# Altium footprint library FPC.PcbLib: 104 footprints (part 6 of 7)
Each footprint in its own frame and in the unit in brackets; x right, y up, seen from the top. Pads: shape width x height; smd on the part's side, far side on the other; paste and mask are expansions set on the pad; w line width, h text height; cw(c..) or ccw(c..) is an arc to the next point about the centre after c.
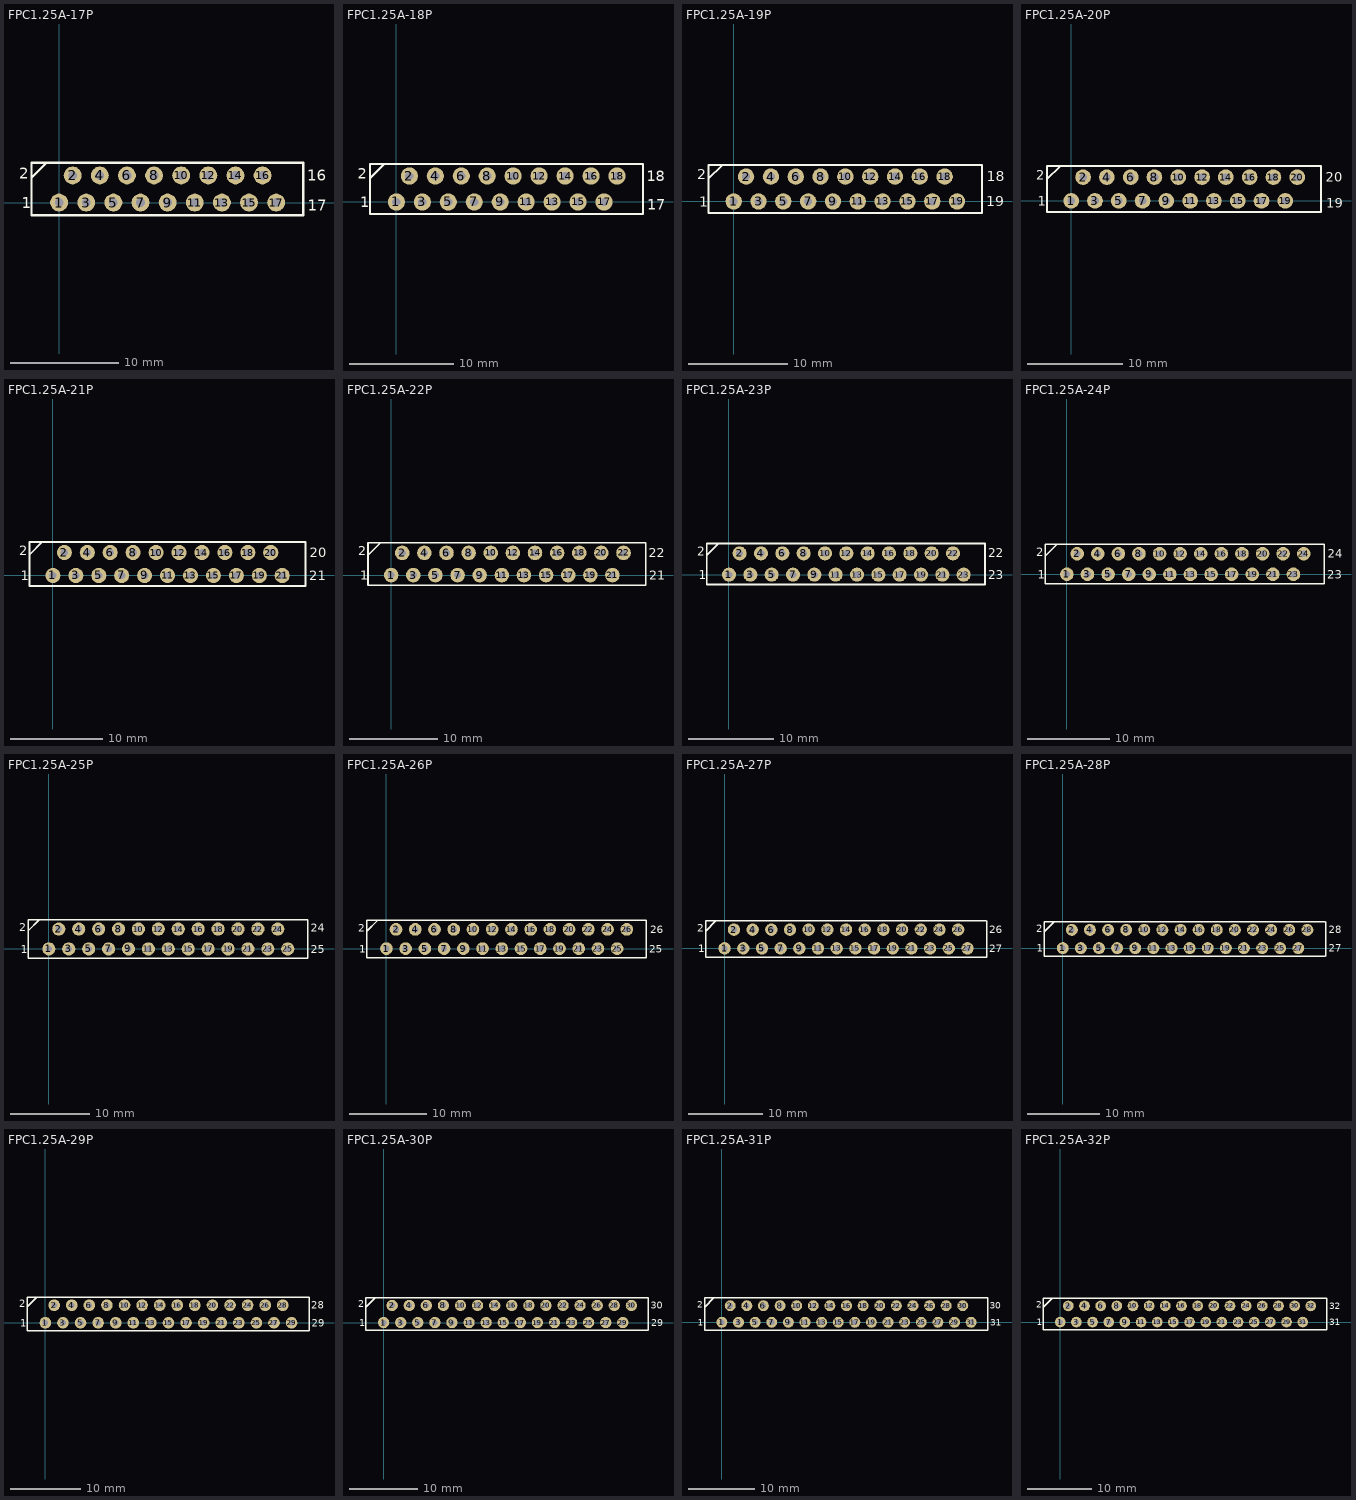
[diagram p5: the footprints below, top view; thin cyan lines are the x and y axes]

## FPC1.25A-17P [mm]
pads (17):
  round 1.65 hole 0.8: 1(0,0) 2(1.25,2.5) 3(2.5,0) 4(3.75,2.5) 5(5,0) 6(6.25,2.5) 7(7.5,0) 8(8.75,2.5) 9(10,0) 10(11.25,2.5) 11(12.5,0) 12(13.75,2.5) 13(15,0) 14(16.25,2.5) 15(17.5,0) 16(18.75,2.5) 17(20,0)
Top Overlay:
  lines w0.2: -2.553,2.266 -1.156,3.663 ; -2.553,-1.163 -2.553,3.663 22.5,3.663 22.5,-1.163 -2.553,-1.163
  text "17" at 22.932,-0.731 h1.02
  text "16" at 22.881,2.012 h1.02
  text "2" at -3.696,2.215 h1.02
  text "1" at -3.462,-0.528 h1.02
3D body "FPC1.25-17P.STEP": height 7.3, standoff -2.55, extent -2.371,-0.98 22.479,3.52

## FPC1.25A-18P [mm]
pads (18):
  round 1.65 hole 0.8: 1(0,0) 2(1.25,2.5) 3(2.5,0) 4(3.75,2.5) 5(5,0) 6(6.25,2.5) 7(7.5,0) 8(8.75,2.5) 9(10,0) 10(11.25,2.5) 11(12.5,0) 12(13.75,2.5) 13(15,0) 14(16.25,2.5) 15(17.5,0) 16(18.75,2.5) 17(20,0) 18(21.25,2.5)
Top Overlay:
  lines w0.2: -2.553,2.266 -1.156,3.663 ; -2.553,-1.163 -2.553,3.663 23.75,3.663 23.75,-1.163 -2.553,-1.163
  text "17" at 24.182,-0.731 h1.02
  text "18" at 24.131,2.012 h1.02
  text "2" at -3.696,2.215 h1.02
  text "1" at -3.472,-0.528 h1.02
3D body "FPC1.25-18P.STEP": height 7.3, standoff -2.55, extent -2.478,-0.98 23.622,3.52

## FPC1.25A-19P [mm]
pads (19):
  round 1.65 hole 0.8: 1(0,0) 2(1.25,2.5) 3(2.5,0) 4(3.75,2.5) 5(5,0) 6(6.25,2.5) 7(7.5,0) 8(8.75,2.5) 9(10,0) 10(11.25,2.5) 11(12.5,0) 12(13.75,2.5) 13(15,0) 14(16.25,2.5) 15(17.5,0) 16(18.75,2.5) 17(20,0) 18(21.25,2.5) 19(22.5,0)
Top Overlay:
  lines w0.2: -2.553,2.266 -1.156,3.663 ; -2.553,-1.163 -2.553,3.663 25,3.663 25,-1.163 -2.553,-1.163
  text "19" at 25.455,-0.508 h1.02
  text "18" at 25.508,2.012 h1.02
  text "2" at -3.696,2.215 h1.02
  text "1" at -3.482,-0.528 h1.02
3D body "FPC1.25-19P.STEP": height 7.3, standoff -2.55, extent -2.458,-0.98 24.892,3.52

## FPC1.25A-20P [mm]
pads (20):
  round 1.65 hole 0.8: 1(0,0) 2(1.25,2.5) 3(2.5,0) 4(3.75,2.5) 5(5,0) 6(6.25,2.5) 7(7.5,0) 8(8.75,2.5) 9(10,0) 10(11.25,2.5) 11(12.5,0) 12(13.75,2.5) 13(15,0) 14(16.25,2.5) 15(17.5,0) 16(18.75,2.5) 17(20,0) 18(21.25,2.5) 19(22.5,0) 20(23.75,2.5)
Top Overlay:
  lines w0.2: -2.553,2.266 -1.156,3.663 ; -2.553,-1.163 26.25,-1.163 26.25,3.663 -2.553,3.663 -2.553,-1.163
  text "1" at -3.492,-0.528 h1.02
  text "2" at -3.696,2.215 h1.02
  text "20" at 26.758,2.012 h1.02
  text "19" at 26.809,-0.731 h1.02
3D body "FPC1.25-20P.STEP": height 7.3, standoff -2.55, extent -2.438,-0.98 26.162,3.52

## FPC1.25A-21P [mm]
pads (21):
  round 1.65 hole 0.8: 1(0,0) 2(1.25,2.5) 3(2.5,0) 4(3.75,2.5) 5(5,0) 6(6.25,2.5) 7(7.5,0) 8(8.75,2.5) 9(10,0) 10(11.25,2.5) 11(12.5,0) 12(13.75,2.5) 13(15,0) 14(16.25,2.5) 15(17.5,0) 16(18.75,2.5) 17(20,0) 18(21.25,2.5) 19(22.5,0) 20(23.75,2.5) 21(25,0)
Top Overlay:
  lines w0.2: -2.553,2.266 -1.156,3.663 ; -2.553,-1.163 27.553,-1.163 27.553,3.663 -2.553,3.663 -2.553,-1.163
  text "1" at -3.502,-0.528 h1.02
  text "2" at -3.696,2.215 h1.02
  text "20" at 27.994,2.012 h1.02
  text "21" at 27.934,-0.528 h1.02
3D body "FPC1.25-21P.STEP": height 7.3, standoff -2.55, extent -2.468,-0.98 27.432,3.52

## FPC1.25A-22P [mm]
pads (22):
  round 1.65 hole 0.8: 1(0,0) 2(1.25,2.5) 3(2.5,0) 4(3.75,2.5) 5(5,0) 6(6.25,2.5) 7(7.5,0) 8(8.75,2.5) 9(10,0) 10(11.25,2.5) 11(12.5,0) 12(13.75,2.5) 13(15,0) 14(16.25,2.5) 15(17.5,0) 16(18.75,2.5) 17(20,0) 18(21.25,2.5) 19(22.5,0) 20(23.75,2.5) 21(25,0) 22(26.25,2.5)
Top Overlay:
  lines w0.2: -2.606,2.266 -1.209,3.663 ; -2.606,-1.163 28.75,-1.163 28.75,3.663 -2.606,3.663 -2.606,-1.163
  text "1" at -3.512,-0.528 h1.02
  text "2" at -3.749,2.215 h1.02
  text "22" at 29.127,2.012 h1.02
  text "21" at 29.131,-0.528 h1.02
3D body "FPC1.25-22P.STEP": height 7.3, standoff -2.55, extent -2.413,-0.98 28.687,3.52

## FPC1.25A-23P [mm]
pads (23):
  round 1.65 hole 0.8: 1(0,0) 2(1.25,2.5) 3(2.5,0) 4(3.75,2.5) 5(5,0) 6(6.25,2.5) 7(7.5,0) 8(8.75,2.5) 9(10,0) 10(11.25,2.5) 11(12.5,0) 12(13.75,2.5) 13(15,0) 14(16.25,2.5) 15(17.5,0) 16(18.75,2.5) 17(20,0) 18(21.25,2.5) 19(22.5,0) 20(23.75,2.5) 21(25,0) 22(26.25,2.5) 23(27.5,0)
Top Overlay:
  lines w0.2: -2.606,2.266 -1.209,3.663 ; -2.606,-1.163 -2.606,3.663 30,3.663 30,-1.163 -2.606,-1.163
  text "23" at 30.381,-0.528 h1.02
  text "22" at 30.387,2.012 h1.02
  text "2" at -3.749,2.215 h1.02
  text "1" at -3.522,-0.528 h1.02
3D body "FPC1.25-23P.STEP": height 7.3, standoff -2.55, extent -2.505,-0.98 29.845,3.52

## FPC1.25A-24P [mm]
pads (24):
  round 1.65 hole 0.8: 1(0,0) 2(1.25,2.5) 3(2.5,0) 4(3.75,2.5) 5(5,0) 6(6.25,2.5) 7(7.5,0) 8(8.75,2.5) 9(10,0) 10(11.25,2.5) 11(12.5,0) 12(13.75,2.5) 13(15,0) 14(16.25,2.5) 15(17.5,0) 16(18.75,2.5) 17(20,0) 18(21.25,2.5) 19(22.5,0) 20(23.75,2.5) 21(25,0) 22(26.25,2.5) 23(27.5,0) 24(28.75,2.5)
Top Overlay:
  lines w0.2: -2.606,2.266 -1.209,3.663 ; -2.606,-1.163 31.25,-1.163 31.25,3.663 -2.606,3.663 -2.606,-1.163
  text "1" at -3.532,-0.528 h1.02
  text "2" at -3.749,2.215 h1.02
  text "24" at 31.647,2.012 h1.02
  text "23" at 31.631,-0.528 h1.02
3D body "FPC1.25-24P.STEP": height 7.3, standoff -2.55, extent -2.485,-0.98 31.115,3.52

## FPC1.25A-25P [mm]
pads (25):
  round 1.65 hole 0.8: 1(0,0) 2(1.25,2.5) 3(2.5,0) 4(3.75,2.5) 5(5,0) 6(6.25,2.5) 7(7.5,0) 8(8.75,2.5) 9(10,0) 10(11.25,2.5) 11(12.5,0) 12(13.75,2.5) 13(15,0) 14(16.25,2.5) 15(17.5,0) 16(18.75,2.5) 17(20,0) 18(21.25,2.5) 19(22.5,0) 20(23.75,2.5) 21(25,0) 22(26.25,2.5) 23(27.5,0) 24(28.75,2.5) 25(30,0)
Top Overlay:
  lines w0.2: -2.606,2.266 -1.209,3.663 ; -2.606,-1.163 32.5,-1.163 32.5,3.663 -2.606,3.663 -2.606,-1.163
  text "1" at -3.542,-0.528 h1.02
  text "2" at -3.749,2.215 h1.02
  text "24" at 32.907,2.139 h1.02
  text "25" at 32.881,-0.528 h1.02
3D body "FPC1.25-25P.STEP": height 7.3, standoff -2.55, extent -2.465,-0.98 32.385,3.52

## FPC1.25A-26P [mm]
pads (26):
  round 1.65 hole 0.8: 1(0,0) 2(1.25,2.5) 3(2.5,0) 4(3.75,2.5) 5(5,0) 6(6.25,2.5) 7(7.5,0) 8(8.75,2.5) 9(10,0) 10(11.25,2.5) 11(12.5,0) 12(13.75,2.5) 13(15,0) 14(16.25,2.5) 15(17.5,0) 16(18.75,2.5) 17(20,0) 18(21.25,2.5) 19(22.5,0) 20(23.75,2.5) 21(25,0) 22(26.25,2.5) 23(27.5,0) 24(28.75,2.5) 25(30,0) 26(31.25,2.5)
Top Overlay:
  lines w0.2: -2.553,2.266 -1.156,3.663 ; -2.553,-1.163 -2.553,3.663 33.803,3.663 33.803,-1.163 -2.553,-1.163
  text "25" at 34.184,-0.528 h1.02
  text "26" at 34.294,2.012 h1.02
  text "2" at -3.696,2.215 h1.02
  text "1" at -3.552,-0.528 h1.02
3D body "FPC1.25-26P.STEP": height 7.3, standoff -2.55, extent -2.445,-0.98 33.655,3.52

## FPC1.25A-27P [mm]
pads (27):
  round 1.65 hole 0.8: 1(0,0) 2(1.25,2.5) 3(2.5,0) 4(3.75,2.5) 5(5,0) 6(6.25,2.5) 7(7.5,0) 8(8.75,2.5) 9(10,0) 10(11.25,2.5) 11(12.5,0) 12(13.75,2.5) 13(15,0) 14(16.25,2.5) 15(17.5,0) 16(18.75,2.5) 17(20,0) 18(21.25,2.5) 19(22.5,0) 20(23.75,2.5) 21(25,0) 22(26.25,2.5) 23(27.5,0) 24(28.75,2.5) 25(30,0) 26(31.25,2.5) 27(32.5,0)
Top Overlay:
  lines w0.2: -2.553,2.266 -1.156,3.663 ; 35,3.663 -2.553,3.663 -2.553,-1.163 35.053,-1.163 35.053,3.663
  text "1" at -3.562,-0.528 h1.02
  text "2" at -3.696,2.215 h1.02
  text "26" at 35.427,2.012 h1.02
  text "27" at 35.434,-0.528 h1.02
3D body "FPC1.25-27P.STEP": height 7.3, standoff -2.55, extent -2.413,-1.107 34.937,3.393

## FPC1.25A-28P [mm]
pads (28):
  round 1.65 hole 0.8: 1(0,0) 2(1.25,2.5) 3(2.5,0) 4(3.75,2.5) 5(5,0) 6(6.25,2.5) 7(7.5,0) 8(8.75,2.5) 9(10,0) 10(11.25,2.5) 11(12.5,0) 12(13.75,2.5) 13(15,0) 14(16.25,2.5) 15(17.5,0) 16(18.75,2.5) 17(20,0) 18(21.25,2.5) 19(22.5,0) 20(23.75,2.5) 21(25,0) 22(26.25,2.5) 23(27.5,0) 24(28.75,2.5) 25(30,0) 26(31.25,2.5) 27(32.5,0) 28(33.75,2.5)
Top Overlay:
  lines w0.2: -2.553,2.266 -1.156,3.663 ; 36.225,-1.163 -2.553,-1.163 -2.553,3.663 36.25,3.663 ; 36.303,-1.163 36.303,3.663
  text "1" at -3.572,-0.528 h1.02
  text "2" at -3.696,2.215 h1.02
  text "28" at 36.687,2.012 h1.02
  text "27" at 36.684,-0.528 h1.02
3D body "FPC1.25-28P.STEP": height 7.3, standoff -2.55, extent -2.54,-0.98 36.16,3.52

## FPC1.25A-29P [mm]
pads (29):
  round 1.65 hole 0.8: 1(0,0) 2(1.25,2.5) 3(2.5,0) 4(3.75,2.5) 5(5,0) 6(6.25,2.5) 7(7.5,0) 8(8.75,2.5) 9(10,0) 10(11.25,2.5) 11(12.5,0) 12(13.75,2.5) 13(15,0) 14(16.25,2.5) 15(17.5,0) 16(18.75,2.5) 17(20,0) 18(21.25,2.5) 19(22.5,0) 20(23.75,2.5) 21(25,0) 22(26.25,2.5) 23(27.5,0) 24(28.75,2.5) 25(30,0) 26(31.25,2.5) 27(32.5,0) 28(33.75,2.5) 29(35,0)
Top Overlay:
  lines w0.2: -2.606,2.266 -1.209,3.663 ; -2.606,-1.163 -2.606,3.663 37.5,3.663 37.5,-1.163 -2.606,-1.163
  text "29" at 37.881,-0.528 h1.02
  text "28" at 37.82,2.012 h1.02
  text "2" at -3.749,2.215 h1.02
  text "1" at -3.582,-0.528 h1.02
3D body "FPC1.25-29P.STEP": height 7.3, standoff -2.55, extent -2.459,-0.853 37.391,3.647

## FPC1.25A-30P [mm]
pads (30):
  round 1.65 hole 0.8: 1(0,0) 2(1.25,2.5) 3(2.5,0) 4(3.75,2.5) 5(5,0) 6(6.25,2.5) 7(7.5,0) 8(8.75,2.5) 9(10,0) 10(11.25,2.5) 11(12.5,0) 12(13.75,2.5) 13(15,0) 14(16.25,2.5) 15(17.5,0) 16(18.75,2.5) 17(20,0) 18(21.25,2.5) 19(22.5,0) 20(23.75,2.5) 21(25,0) 22(26.25,2.5) 23(27.5,0) 24(28.75,2.5) 25(30,0) 26(31.25,2.5) 27(32.5,0) 28(33.75,2.5) 29(35,0) 30(36.25,2.5)
Top Overlay:
  lines w0.2: -2.606,2.266 -1.209,3.663 ; -2.606,-1.163 -2.606,3.663 38.75,3.663 38.75,-1.163 -2.606,-1.163
  text "29" at 39.131,-0.528 h1.02
  text "30" at 39.08,2.012 h1.02
  text "2" at -3.749,2.215 h1.02
  text "1" at -3.592,-0.528 h1.02
3D body "FPC1.25-30P.STEP": height 7.3, standoff -2.55, extent -2.492,-0.98 38.608,3.52

## FPC1.25A-31P [mm]
pads (31):
  round 1.65 hole 0.8: 1(0,0) 2(1.25,2.5) 3(2.5,0) 4(3.75,2.5) 5(5,0) 6(6.25,2.5) 7(7.5,0) 8(8.75,2.5) 9(10,0) 10(11.25,2.5) 11(12.5,0) 12(13.75,2.5) 13(15,0) 14(16.25,2.5) 15(17.5,0) 16(18.75,2.5) 17(20,0) 18(21.25,2.5) 19(22.5,0) 20(23.75,2.5) 21(25,0) 22(26.25,2.5) 23(27.5,0) 24(28.75,2.5) 25(30,0) 26(31.25,2.5) 27(32.5,0) 28(33.75,2.5) 29(35,0) 30(36.25,2.5) 31(37.5,0)
Top Overlay:
  lines w0.2: -2.606,2.266 -1.209,3.663 ; -2.606,-1.163 -2.606,3.663 40,3.663 40,-1.163 -2.606,-1.163
  text "31" at 40.381,-0.528 h1.02
  text "30" at 40.34,2.012 h1.02
  text "2" at -3.749,2.215 h1.02
  text "1" at -3.602,-0.528 h1.02
3D body "FPC1.25-31P.STEP": height 7.3, standoff -2.55, extent -2.286,-0.853 40.064,3.647

## FPC1.25A-32P [mm]
pads (32):
  round 1.65 hole 0.8: 1(0,0) 2(1.25,2.5) 3(2.5,0) 4(3.75,2.5) 5(5,0) 6(6.25,2.5) 7(7.5,0) 8(8.75,2.5) 9(10,0) 10(11.25,2.5) 11(12.5,0) 12(13.75,2.5) 13(15,0) 14(16.25,2.5) 15(17.5,0) 16(18.75,2.5) 17(20,0) 18(21.25,2.5) 19(22.5,0) 20(23.75,2.5) 21(25,0) 22(26.25,2.5) 23(27.5,0) 24(28.75,2.5) 25(30,0) 26(31.25,2.5) 27(32.5,0) 28(33.75,2.5) 29(35,0) 30(36.25,2.5) 31(37.5,0) 32(38.75,2.5)
Top Overlay:
  lines w0.2: -2.606,2.266 -1.209,3.663 ; -2.606,-1.163 41.25,-1.163 41.25,3.663 -2.606,3.663 -2.606,-1.163
  text "1" at -3.612,-0.528 h1.02
  text "2" at -3.749,2.215 h1.02
  text "32" at 41.6,2.012 h1.02
  text "31" at 41.631,-0.528 h1.02
3D body "FPC1.25-32P.STEP": height 7.3, standoff -2.55, extent -2.35,-0.98 41.25,3.52